# Altium schematic symbol library TBP02R1-381-13BE.SchLib: 1 symbol
Pins are listed as number, name and electrical type; pins without a type are passive.

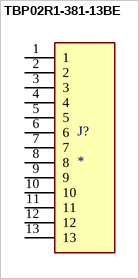
[diagram p0: symbol TBP02R1-381-13BE]

## TBP02R1-381-13BE
designator J?
2~24 Poles, Pluggable,Receptacle, Horizontal, 3.81 Pitch, Terminal Block Connector; MANUFACTURER: Same Sky; MPN: TBP02R1-381-13BE; DATASHEET_URL: https://s3.amazonaws.com/snapeda/datasheet/TBP02R1-381-13BE_CUI_Devices.pdf; STANDARD: Manufacturer Recommendations; Value: *; SOURCE_URL: https://www.snapeda.com/parts/TBP02R1-381-13BE/Same+Sky/view-part/
footprint CUI_TBP02R1-381-13BE
pins: 1, 2, 3, 4, 5, 6, 7, 8, 9, 10, 11, 12, 13